# Altium footprint library ProjectFootprints-20261026_223942_842.PcbLib: 49 footprints (part 3 of 4)
Each footprint in its own frame and in the unit in brackets; x right, y up, seen from the top. Pads: shape width x height; smd on the part's side, far side on the other; paste and mask are expansions set on the pad; w line width, h text height; cw(c..) or ccw(c..) is an arc to the next point about the centre after c.
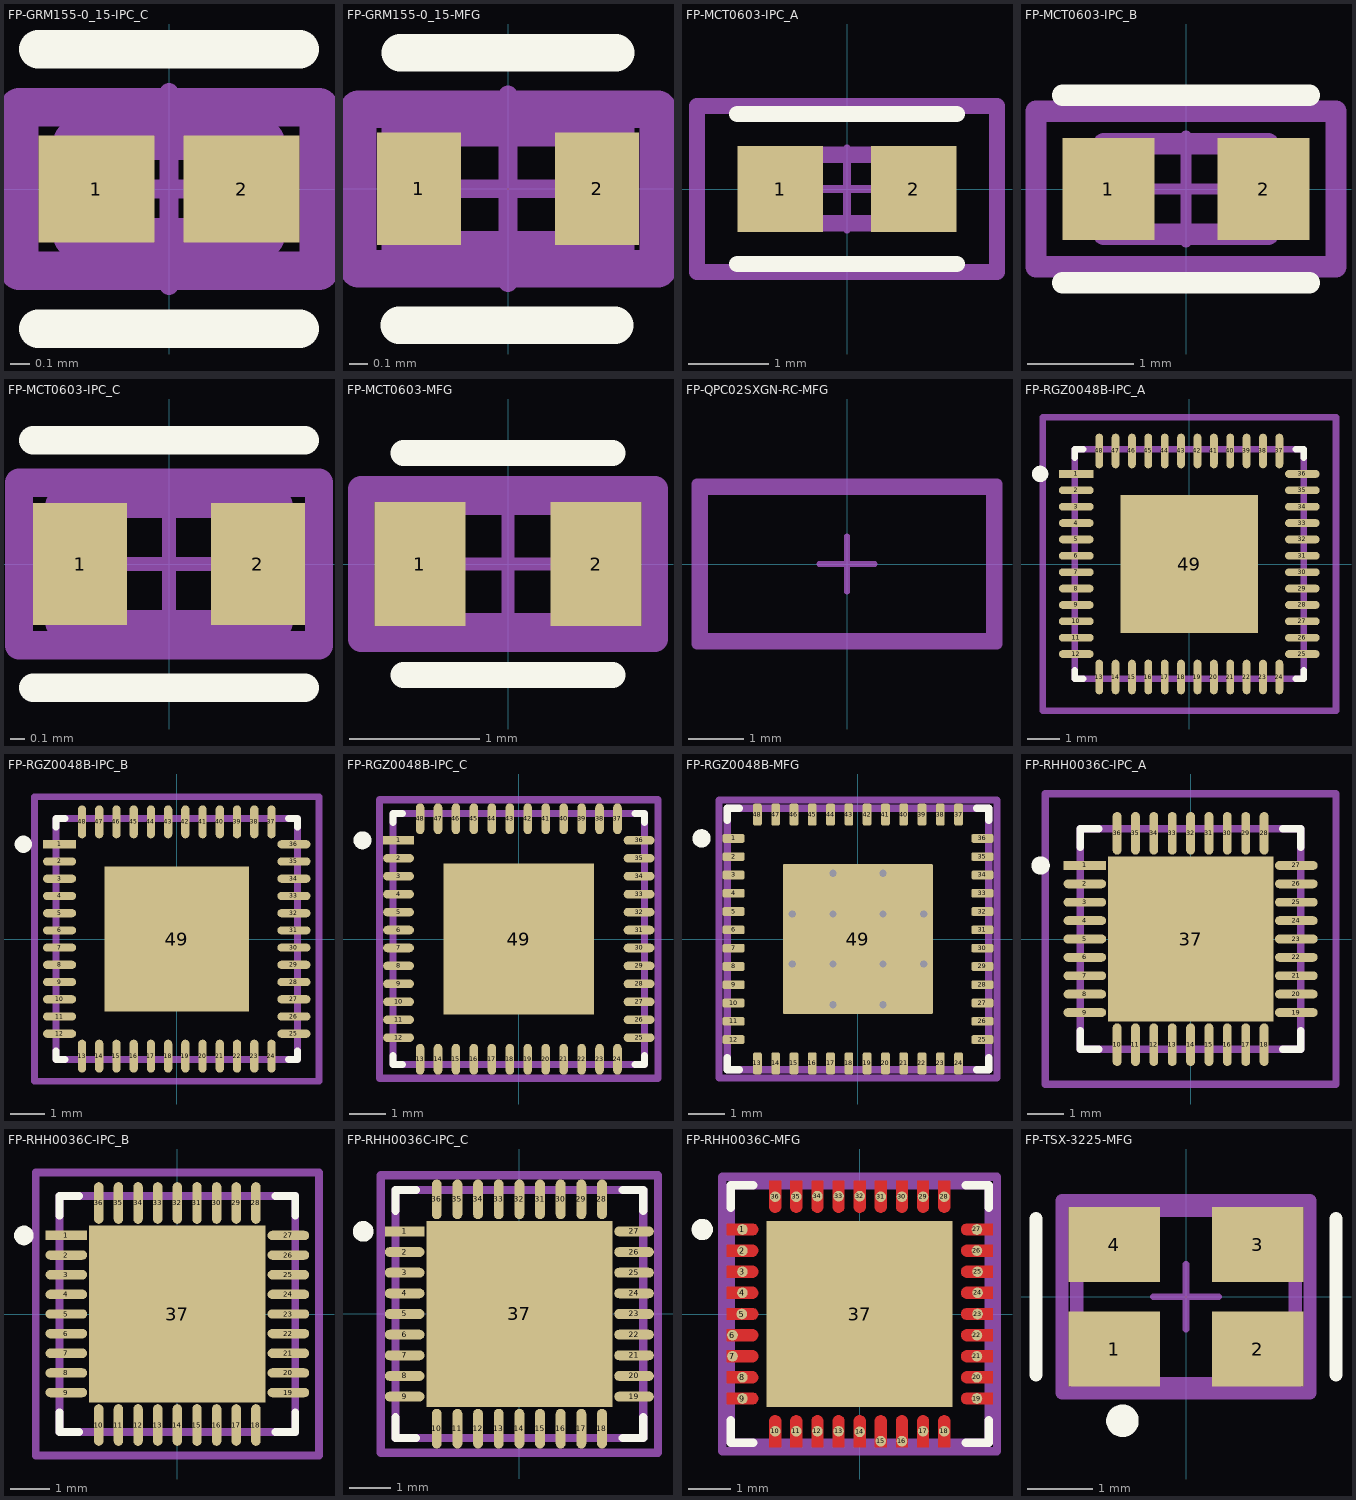
[diagram p2: the footprints below, top view; thin cyan lines are the x and y axes]

## FP-GRM155-0_15-IPC_C [mm]
pads (2):
  rect 0.604x0.558 smd paste+0 mask+0: 1(-0.377,0) 2(0.377,0)
Top Overlay:
  lines w0.2: -0.679,-0.725 0.679,-0.725 ; -0.679,0.725 0.679,0.725
Top Assembly:
  lines w0.2: -0.779,-0.425 -0.779,0.425 0.779,0.425 0.779,-0.425 -0.779,-0.425
  text ".Designator" at 0,0.188 h1
Top 3D Body:
  lines w0.2: -0.5,-0.25 -0.5,0.25 0.5,0.25 0.5,-0.25 -0.5,-0.25
Top Courtyard:
  lines w0.2: -0.779,-0.425 -0.779,0.425 0.779,0.425 0.779,-0.425 -0.779,-0.425
Top Component Center:
  lines w0.1: -0.5,0 0.5,0 ; 0,-0.5 0,0.5
3D body "Cap_Murata_GRM155R61A475MEAAD_eec.STEP": height 0.25, standoff 0, extent -0.779,-0.425 0.779,0.425

## FP-GRM155-0_15-MFG [mm]
pads (2):
  rect 0.45x0.6 smd paste+0 mask+0: 1(-0.475,0) 2(0.475,0)
Top Overlay:
  lines w0.2: -0.58,-0.727 0.57,-0.727 ; -0.575,0.725 0.575,0.725
Top Assembly:
  lines w0.2: -0.8,-0.425 -0.8,0.425 0.8,0.425 0.8,-0.425 -0.8,-0.425
  text ".Designator" at 0,0.188 h1
Top 3D Body:
  lines w0.2: -0.575,-0.325 -0.575,0.325 0.575,0.325 0.575,-0.325 -0.575,-0.325
Top Courtyard:
  lines w0.2: -0.8,-0.425 -0.8,0.425 0.8,0.425 0.8,-0.425 -0.8,-0.425
Top Component Center:
  lines w0.1: -0.5,0 0.5,0 ; 0,-0.5 0,0.5
3D body "Cap_Murata_GRM155R61A475MEAAD_eec.STEP": height 0.25, standoff 0, extent -0.8,-0.425 0.8,0.425

## FP-MCT0603-IPC_A [mm]
pads (2):
  rect 1.064x1.062 smd paste+0 mask+0: 1(-0.829,0) 2(0.829,0)
Top Overlay:
  lines w0.2: -1.361,-0.931 1.361,-0.931 ; -1.361,0.931 1.361,0.931
Top Assembly:
  lines w0.2: -1.861,-1.031 1.861,-1.031 1.861,1.031 -1.861,1.031 -1.861,-1.031
  text ".Designator" at 0,0.188 h1
Top 3D Body:
  lines w0.2: -0.775,-0.425 0.775,-0.425 0.775,0.425 -0.775,0.425 -0.775,-0.425
Top Courtyard:
  lines w0.2: -1.861,-1.031 1.861,-1.031 1.861,1.031 -1.861,1.031 -1.861,-1.031
Top Component Center:
  lines w0.1: -0.5,0 0.5,0 ; 0,-0.5 0,0.5
3D body "Res_Vishay_MCT06030F2152BP100_eec.STEP": height 0.25, standoff 0, extent -1.861,-1.031 1.861,1.031

## FP-MCT0603-IPC_B [mm]
pads (2):
  rect 0.864x0.962 smd paste+0 mask+0: 1(-0.729,0) 2(0.729,0)
Top Overlay:
  lines w0.2: -1.161,-0.881 1.161,-0.881 ; -1.161,0.881 1.161,0.881
Top Assembly:
  lines w0.2: -1.411,-0.731 -1.411,0.731 1.411,0.731 1.411,-0.731 -1.411,-0.731
  text ".Designator" at 0,0.188 h1
Top 3D Body:
  lines w0.2: -0.775,-0.425 -0.775,0.425 0.775,0.425 0.775,-0.425 -0.775,-0.425
Top Courtyard:
  lines w0.2: -1.411,-0.731 -1.411,0.731 1.411,0.731 1.411,-0.731 -1.411,-0.731
Top Component Center:
  lines w0.1: -0.5,0 0.5,0 ; 0,-0.5 0,0.5
3D body "Res_Vishay_MCT06030F2152BP100_eec.STEP": height 0.25, standoff 0, extent -1.411,-0.731 1.411,0.731

## FP-MCT0603-IPC_C [mm]
pads (2):
  rect 0.664x0.862 smd paste+0 mask+0: 1(-0.629,0) 2(0.629,0)
Top Overlay:
  lines w0.2: -0.961,-0.875 0.961,-0.875 ; -0.961,0.875 0.961,0.875
Top Assembly:
  lines w0.2: -1.061,-0.575 -1.061,0.575 1.061,0.575 1.061,-0.575 -1.061,-0.575
  text ".Designator" at 0,0.188 h1
Top 3D Body:
  lines w0.2: -0.775,-0.425 -0.775,0.425 0.775,0.425 0.775,-0.425 -0.775,-0.425
Top Courtyard:
  lines w0.2: -1.061,-0.575 -1.061,0.575 1.061,0.575 1.061,-0.575 -1.061,-0.575
Top Component Center:
  lines w0.1: -0.5,0 0.5,0 ; 0,-0.5 0,0.5
3D body "Res_Vishay_MCT06030F2152BP100_eec.STEP": height 0.25, standoff 0, extent -1.061,-0.575 1.061,0.575

## FP-MCT0603-MFG [mm]
pads (2):
  rect 0.7x0.95 smd paste+0 mask+0: 1(-0.675,0) 2(0.675,0)
Top Overlay:
  lines w0.2: -0.8,-0.85 0.8,-0.85 ; -0.8,0.85 0.8,0.85
Top Assembly:
  lines w0.2: -1.125,-0.575 -1.125,0.575 1.125,0.575 1.125,-0.575 -1.125,-0.575
  text ".Designator" at 0,0.188 h1
Top 3D Body:
  lines w0.2: -0.8,-0.475 -0.8,0.475 0.8,0.475 0.8,-0.475 -0.8,-0.475
Top Courtyard:
  lines w0.2: -1.125,-0.575 -1.125,0.575 1.125,0.575 1.125,-0.575 -1.125,-0.575
Top Component Center:
  lines w0.1: -0.5,0 0.5,0 ; 0,-0.5 0,0.5
3D body "Res_Vishay_MCT06030F2152BP100_eec.STEP": height 0.25, standoff 0, extent -1.125,-0.575 1.125,0.575

## FP-QPC02SXGN-RC-MFG [mm]
Top Assembly:
  lines w0.2: -2.691,-1.433 2.691,-1.433 2.691,1.433 -2.691,1.433 -2.691,-1.433
Top 3D Body:
  lines w0.2: -2.591,-1.333 2.591,-1.333 2.591,1.333 -2.591,1.333 -2.591,-1.333
Top Courtyard:
  lines w0.2: -2.691,-1.433 2.691,-1.433 2.691,1.433 -2.691,1.433 -2.691,-1.433
Top Component Center:
  lines w0.1: -0.5,0 0.5,0 ; 0,-0.5 0,0.5
3D body "Conn_Sullins_QPC02SXGN-RC_eec.STEP": height 0.25, standoff 0, extent -2.691,-1.433 2.691,1.433

## FP-RGZ0048B-IPC_A [mm]
pads (49):
  rect 1.057x0.239 smd paste+0 mask+0: 1(-3.451,2.75)
  rrect100% 1.057x0.239 smd paste+0 mask+0: 2(-3.451,2.25) 3(-3.451,1.75) 4(-3.451,1.25) 5(-3.451,0.75) 6(-3.451,0.25) 7(-3.451,-0.25) 8(-3.451,-0.75) 9(-3.451,-1.25) 10(-3.451,-1.75) 11(-3.451,-2.25) 12(-3.451,-2.75) 25(3.451,-2.75) 26(3.451,-2.25) 27(3.451,-1.75) 28(3.451,-1.25) 29(3.451,-0.75) 30(3.451,-0.25) 31(3.451,0.25) 32(3.451,0.75) 33(3.451,1.25) 34(3.451,1.75) 35(3.451,2.25) 36(3.451,2.75)
  rrect100% 0.239x1.057 smd paste+0 mask+0: 13(-2.75,-3.451) 14(-2.25,-3.451) 15(-1.75,-3.451) 16(-1.25,-3.451) 17(-0.75,-3.451) 18(-0.25,-3.451) 19(0.25,-3.451) 20(0.75,-3.451) 21(1.25,-3.451) 22(1.75,-3.451) 23(2.25,-3.451) 24(2.75,-3.451) 37(2.75,3.451) 38(2.25,3.451) 39(1.75,3.451) 40(1.25,3.451) 41(0.75,3.451) 42(0.25,3.451) 43(-0.25,3.451) 44(-0.75,3.451) 45(-1.25,3.451) 46(-1.75,3.451) 47(-2.25,3.451) 48(-2.75,3.451)
  rect 4.2x4.2 smd paste-1000 mask+0: 49(0,0)
Top Overlay:
  circle w0.25: c-4.554,2.75 r0.125
  lines w0.2: -3.5,-3.245 -3.5,-3.5 -3.245,-3.5 ; -3.5,3.245 -3.5,3.5 -3.245,3.5 ; 3.245,-3.5 3.5,-3.5 3.5,-3.245 ; 3.245,3.5 3.5,3.5 3.5,3.245
Top Paste:
  rectangle: -1.328,-1.328 1.328,1.328
Top Assembly:
  lines w0.2: -4.479,-4.479 -4.479,4.479 4.479,4.479 4.479,-4.479 -4.479,-4.479
  text ".Designator" at 0,-0.001 h1
Top 3D Body:
  lines w0.2: -3.5,-3.5 -3.5,3.5 3.5,3.5 3.5,-3.5 -3.5,-3.5
Top Courtyard:
  lines w0.2: -4.479,-4.479 -4.479,4.479 4.479,4.479 4.479,-4.479 -4.479,-4.479
Top Component Center:
  lines w0.1: -0.5,0 0.5,0 ; 0,-0.5 0,0.5
3D body "IC_Texas_Instruments_DP83867IRRGZR_eec.STEP": height 0.25, standoff 0, extent -4.479,-4.479 4.479,4.479

## FP-RGZ0048B-IPC_B [mm]
pads (49):
  rect 0.957x0.239 smd paste+0 mask+0: 1(-3.401,2.75)
  rrect100% 0.957x0.239 smd paste+0 mask+0: 2(-3.401,2.25) 3(-3.401,1.75) 4(-3.401,1.25) 5(-3.401,0.75) 6(-3.401,0.25) 7(-3.401,-0.25) 8(-3.401,-0.75) 9(-3.401,-1.25) 10(-3.401,-1.75) 11(-3.401,-2.25) 12(-3.401,-2.75) 25(3.401,-2.75) 26(3.401,-2.25) 27(3.401,-1.75) 28(3.401,-1.25) 29(3.401,-0.75) 30(3.401,-0.25) 31(3.401,0.25) 32(3.401,0.75) 33(3.401,1.25) 34(3.401,1.75) 35(3.401,2.25) 36(3.401,2.75)
  rrect100% 0.239x0.957 smd paste+0 mask+0: 13(-2.75,-3.401) 14(-2.25,-3.401) 15(-1.75,-3.401) 16(-1.25,-3.401) 17(-0.75,-3.401) 18(-0.25,-3.401) 19(0.25,-3.401) 20(0.75,-3.401) 21(1.25,-3.401) 22(1.75,-3.401) 23(2.25,-3.401) 24(2.75,-3.401) 37(2.75,3.401) 38(2.25,3.401) 39(1.75,3.401) 40(1.25,3.401) 41(0.75,3.401) 42(0.25,3.401) 43(-0.25,3.401) 44(-0.75,3.401) 45(-1.25,3.401) 46(-1.75,3.401) 47(-2.25,3.401) 48(-2.75,3.401)
  rect 4.2x4.2 smd paste-1000 mask+0: 49(0,0)
Top Overlay:
  circle w0.25: c-4.454,2.75 r0.125
  lines w0.2: -3.5,-3.245 -3.5,-3.5 -3.245,-3.5 ; -3.5,3.245 -3.5,3.5 -3.245,3.5 ; 3.245,-3.5 3.5,-3.5 3.5,-3.245 ; 3.245,3.5 3.5,3.5 3.5,3.245
Top Paste:
  rectangle: -1.328,-1.328 1.328,1.328
Top Assembly:
  lines w0.2: -4.129,-4.129 -4.129,4.129 4.129,4.129 4.129,-4.129 -4.129,-4.129
  text ".Designator" at 0,-0.001 h1
Top 3D Body:
  lines w0.2: -3.5,-3.5 -3.5,3.5 3.5,3.5 3.5,-3.5 -3.5,-3.5
Top Courtyard:
  lines w0.2: -4.129,-4.129 -4.129,4.129 4.129,4.129 4.129,-4.129 -4.129,-4.129
Top Component Center:
  lines w0.1: -0.5,0 0.5,0 ; 0,-0.5 0,0.5
3D body "IC_Texas_Instruments_DP83867IRRGZR_eec.STEP": height 0.25, standoff 0, extent -4.129,-4.129 4.129,4.129

## FP-RGZ0048B-IPC_C [mm]
pads (49):
  rect 0.857x0.239 smd paste+0 mask+0: 1(-3.351,2.75)
  rrect100% 0.857x0.239 smd paste+0 mask+0: 2(-3.351,2.25) 3(-3.351,1.75) 4(-3.351,1.25) 5(-3.351,0.75) 6(-3.351,0.25) 7(-3.351,-0.25) 8(-3.351,-0.75) 9(-3.351,-1.25) 10(-3.351,-1.75) 11(-3.351,-2.25) 12(-3.351,-2.75) 25(3.351,-2.75) 26(3.351,-2.25) 27(3.351,-1.75) 28(3.351,-1.25) 29(3.351,-0.75) 30(3.351,-0.25) 31(3.351,0.25) 32(3.351,0.75) 33(3.351,1.25) 34(3.351,1.75) 35(3.351,2.25) 36(3.351,2.75)
  rrect100% 0.239x0.857 smd paste+0 mask+0: 13(-2.75,-3.351) 14(-2.25,-3.351) 15(-1.75,-3.351) 16(-1.25,-3.351) 17(-0.75,-3.351) 18(-0.25,-3.351) 19(0.25,-3.351) 20(0.75,-3.351) 21(1.25,-3.351) 22(1.75,-3.351) 23(2.25,-3.351) 24(2.75,-3.351) 37(2.75,3.351) 38(2.25,3.351) 39(1.75,3.351) 40(1.25,3.351) 41(0.75,3.351) 42(0.25,3.351) 43(-0.25,3.351) 44(-0.75,3.351) 45(-1.25,3.351) 46(-1.75,3.351) 47(-2.25,3.351) 48(-2.75,3.351)
  rect 4.2x4.2 smd paste-1000 mask+0: 49(0,0)
Top Overlay:
  circle w0.25: c-4.354,2.75 r0.125
  lines w0.2: -3.5,-3.245 -3.5,-3.5 -3.245,-3.5 ; -3.5,3.245 -3.5,3.5 -3.245,3.5 ; 3.245,-3.5 3.5,-3.5 3.5,-3.245 ; 3.245,3.5 3.5,3.5 3.5,3.245
Top Paste:
  rectangle: -1.328,-1.328 1.328,1.328
Top Assembly:
  lines w0.2: -3.879,-3.879 -3.879,3.879 3.879,3.879 3.879,-3.879 -3.879,-3.879
  text ".Designator" at 0,-0.001 h1
Top 3D Body:
  lines w0.2: -3.5,-3.5 -3.5,3.5 3.5,3.5 3.5,-3.5 -3.5,-3.5
Top Courtyard:
  lines w0.2: -3.879,-3.879 -3.879,3.879 3.879,3.879 3.879,-3.879 -3.879,-3.879
Top Component Center:
  lines w0.1: -0.5,0 0.5,0 ; 0,-0.5 0,0.5
3D body "IC_Texas_Instruments_DP83867IRRGZR_eec.STEP": height 0.25, standoff 0, extent -3.879,-3.879 3.879,3.879

## FP-RGZ0048B-MFG [mm]
pads (49):
  rrect42% 0.6x0.24 smd paste+0 mask+0: 1(-3.4,2.75) 2(-3.4,2.25) 3(-3.4,1.75) 4(-3.4,1.25) 5(-3.4,0.75) 6(-3.4,0.25) 7(-3.4,-0.25) 8(-3.4,-0.75) 9(-3.4,-1.25) 10(-3.4,-1.75) 11(-3.4,-2.25) 12(-3.4,-2.75) 25(3.4,-2.75) 26(3.4,-2.25) 27(3.4,-1.75) 28(3.4,-1.25) 29(3.4,-0.75) 30(3.4,-0.25) 31(3.4,0.25) 32(3.4,0.75) 33(3.4,1.25) 34(3.4,1.75) 35(3.4,2.25) 36(3.4,2.75)
  rrect42% 0.24x0.6 smd paste+0 mask+0: 13(-2.75,-3.4) 14(-2.25,-3.4) 15(-1.75,-3.4) 16(-1.25,-3.4) 17(-0.75,-3.4) 18(-0.25,-3.4) 19(0.25,-3.4) 20(0.75,-3.4) 21(1.25,-3.4) 22(1.75,-3.4) 23(2.25,-3.4) 24(2.75,-3.4) 37(2.75,3.4) 38(2.25,3.4) 39(1.75,3.4) 40(1.25,3.4) 41(0.75,3.4) 42(0.25,3.4) 43(-0.25,3.4) 44(-0.75,3.4) 45(-1.25,3.4) 46(-1.75,3.4) 47(-2.25,3.4) 48(-2.75,3.4)
  rrect2% 4.1x4.1 smd paste-1000 mask+0: 49(0,0)
via -1.8,0.685 diameter 0.5 hole 0.2
via -1.8,-0.685 diameter 0.5 hole 0.2
via -0.685,-0.685 diameter 0.5 hole 0.2
via -0.685,0.685 diameter 0.5 hole 0.2
via 0.685,0.685 diameter 0.5 hole 0.2
via 1.8,0.685 diameter 0.5 hole 0.2
via 0.685,-0.685 diameter 0.5 hole 0.2
via 1.8,-0.685 diameter 0.5 hole 0.2
via -0.685,1.8 diameter 0.5 hole 0.2
via -0.685,-1.8 diameter 0.5 hole 0.2
via 0.685,-1.8 diameter 0.5 hole 0.2
via 0.685,1.8 diameter 0.5 hole 0.2
Top Overlay:
  circle w0.25: c-4.275,2.75 r0.125
  lines w0.2: -3.575,-3.245 -3.575,-3.575 -3.245,-3.575 ; -3.575,3.245 -3.575,3.575 -3.245,3.575 ; 3.245,-3.575 3.575,-3.575 3.575,-3.245 ; 3.245,3.575 3.575,3.575 3.575,3.245
Top Paste:
  drawing of 9 lines, arcs and shapes, not listed
Top Assembly:
  lines w0.2: -3.8,-3.8 3.8,-3.8 3.8,3.8 -3.8,3.8 -3.8,-3.8
  text ".Designator" at 0,-0.001 h1
Top 3D Body:
  lines w0.2: -3.575,-3.575 3.575,-3.575 3.575,3.575 -3.575,3.575 -3.575,-3.575
Top Courtyard:
  lines w0.2: -3.8,-3.8 3.8,-3.8 3.8,3.8 -3.8,3.8 -3.8,-3.8
Top Component Center:
  lines w0.1: -0.5,0 0.5,0 ; 0,-0.5 0,0.5
3D body "IC_Texas_Instruments_DP83867IRRGZR_eec.STEP": height 0.25, standoff 0, extent -3.8,-3.8 3.8,3.8

## FP-RHH0036C-IPC_A [mm]
pads (37):
  rect 1.16x0.239 smd paste+0 mask+0: 1(-2.876,2)
  rrect100% 1.16x0.239 smd paste+0 mask+0: 2(-2.876,1.5) 3(-2.876,1) 4(-2.876,0.5) 5(-2.876,0) 6(-2.876,-0.5) 7(-2.876,-1) 8(-2.876,-1.5) 9(-2.876,-2) 19(2.876,-2) 20(2.876,-1.5) 21(2.876,-1) 22(2.876,-0.5) 23(2.876,0) 24(2.876,0.5) 25(2.876,1) 26(2.876,1.5) 27(2.876,2)
  rrect100% 0.239x1.16 smd paste+0 mask+0: 10(-2,-2.876) 11(-1.5,-2.876) 12(-1,-2.876) 13(-0.5,-2.876) 14(0,-2.876) 15(0.5,-2.876) 16(1,-2.876) 17(1.5,-2.876) 18(2,-2.876) 28(2,2.876) 29(1.5,2.876) 30(1,2.876) 31(0.5,2.876) 32(0,2.876) 33(-0.5,2.876) 34(-1,2.876) 35(-1.5,2.876) 36(-2,2.876)
  rect 4.5x4.5 smd paste-1000 mask+0: 37(0,0)
Top Overlay:
  circle w0.25: c-4.081,2 r0.125
  lines w0.2: -3,-2.5 -3,-3 -2.5,-3 ; -3,2.5 -3,3 -2.5,3 ; 2.5,-3 3,-3 3,-2.5 ; 2.5,3 3,3 3,2.5
Top Paste:
  rectangle: -1.699,0.276 -0.276,1.699
  rectangle: 0.276,0.276 1.699,1.699
  rectangle: -1.699,-1.699 -0.276,-0.276
  rectangle: 0.276,-1.699 1.699,-0.276
Top Assembly:
  lines w0.2: -3.956,-3.956 3.956,-3.956 3.956,3.956 -3.956,3.956 -3.956,-3.956
  text ".Designator" at 0,-0.001 h1
Top 3D Body:
  lines w0.2: -3,-3 3,-3 3,3 -3,3 -3,-3
Top Courtyard:
  lines w0.2: -3.956,-3.956 3.956,-3.956 3.956,3.956 -3.956,3.956 -3.956,-3.956
Top Component Center:
  lines w0.1: -0.5,0 0.5,0 ; 0,-0.5 0,0.5
3D body "IC_Texas_Instruments_CC1110F32RHHR_eec.STEP": height 0.25, standoff 0, extent -3.956,-3.956 3.956,3.956

## FP-RHH0036C-IPC_B [mm]
pads (37):
  rect 1.06x0.239 smd paste+0 mask+0: 1(-2.826,2)
  rrect100% 1.06x0.239 smd paste+0 mask+0: 2(-2.826,1.5) 3(-2.826,1) 4(-2.826,0.5) 5(-2.826,0) 6(-2.826,-0.5) 7(-2.826,-1) 8(-2.826,-1.5) 9(-2.826,-2) 19(2.826,-2) 20(2.826,-1.5) 21(2.826,-1) 22(2.826,-0.5) 23(2.826,0) 24(2.826,0.5) 25(2.826,1) 26(2.826,1.5) 27(2.826,2)
  rrect100% 0.239x1.06 smd paste+0 mask+0: 10(-2,-2.826) 11(-1.5,-2.826) 12(-1,-2.826) 13(-0.5,-2.826) 14(0,-2.826) 15(0.5,-2.826) 16(1,-2.826) 17(1.5,-2.826) 18(2,-2.826) 28(2,2.826) 29(1.5,2.826) 30(1,2.826) 31(0.5,2.826) 32(0,2.826) 33(-0.5,2.826) 34(-1,2.826) 35(-1.5,2.826) 36(-2,2.826)
  rect 4.5x4.5 smd paste-1000 mask+0: 37(0,0)
Top Overlay:
  circle w0.25: c-3.906,2 r0.125
  lines w0.2: -3,-2.5 -3,-3 -2.5,-3 ; -3,2.5 -3,3 -2.5,3 ; 2.5,-3 3,-3 3,-2.5 ; 2.5,3 3,3 3,2.5
Top Paste:
  rectangle: 0.276,-1.699 1.699,-0.276
  rectangle: -1.699,-1.699 -0.276,-0.276
  rectangle: 0.276,0.276 1.699,1.699
  rectangle: -1.699,0.276 -0.276,1.699
Top Assembly:
  lines w0.2: -3.606,-3.606 -3.606,3.606 3.606,3.606 3.606,-3.606 -3.606,-3.606
  text ".Designator" at 0,-0.001 h1
Top 3D Body:
  lines w0.2: -3,-3 -3,3 3,3 3,-3 -3,-3
Top Courtyard:
  lines w0.2: -3.606,-3.606 -3.606,3.606 3.606,3.606 3.606,-3.606 -3.606,-3.606
Top Component Center:
  lines w0.1: -0.5,0 0.5,0 ; 0,-0.5 0,0.5
3D body "IC_Texas_Instruments_CC1110F32RHHR_eec.STEP": height 0.25, standoff 0, extent -3.606,-3.606 3.606,3.606

## FP-RHH0036C-IPC_C [mm]
pads (37):
  rect 0.96x0.239 smd paste+0 mask+0: 1(-2.776,2)
  rrect100% 0.96x0.239 smd paste+0 mask+0: 2(-2.776,1.5) 3(-2.776,1) 4(-2.776,0.5) 5(-2.776,0) 6(-2.776,-0.5) 7(-2.776,-1) 8(-2.776,-1.5) 9(-2.776,-2) 19(2.776,-2) 20(2.776,-1.5) 21(2.776,-1) 22(2.776,-0.5) 23(2.776,0) 24(2.776,0.5) 25(2.776,1) 26(2.776,1.5) 27(2.776,2)
  rrect100% 0.239x0.96 smd paste+0 mask+0: 10(-2,-2.776) 11(-1.5,-2.776) 12(-1,-2.776) 13(-0.5,-2.776) 14(0,-2.776) 15(0.5,-2.776) 16(1,-2.776) 17(1.5,-2.776) 18(2,-2.776) 28(2,2.776) 29(1.5,2.776) 30(1,2.776) 31(0.5,2.776) 32(0,2.776) 33(-0.5,2.776) 34(-1,2.776) 35(-1.5,2.776) 36(-2,2.776)
  rect 4.5x4.5 smd paste-1000 mask+0: 37(0,0)
Top Overlay:
  circle w0.25: c-3.781,2 r0.125
  lines w0.2: -3,-2.5 -3,-3 -2.5,-3 ; -3,2.5 -3,3 -2.5,3 ; 2.5,-3 3,-3 3,-2.5 ; 2.5,3 3,3 3,2.5
Top Paste:
  rectangle: 0.276,-1.699 1.699,-0.276
  rectangle: -1.699,-1.699 -0.276,-0.276
  rectangle: 0.276,0.276 1.699,1.699
  rectangle: -1.699,0.276 -0.276,1.699
Top Assembly:
  lines w0.2: -3.356,-3.356 -3.356,3.356 3.356,3.356 3.356,-3.356 -3.356,-3.356
  text ".Designator" at 0,-0.001 h1
Top 3D Body:
  lines w0.2: -3,-3 -3,3 3,3 3,-3 -3,-3
Top Courtyard:
  lines w0.2: -3.356,-3.356 -3.356,3.356 3.356,3.356 3.356,-3.356 -3.356,-3.356
Top Component Center:
  lines w0.1: -0.5,0 0.5,0 ; 0,-0.5 0,0.5
3D body "IC_Texas_Instruments_CC1110F32RHHR_eec.STEP": height 0.25, standoff 0, extent -3.356,-3.356 3.356,3.356

## FP-RHH0036C-MFG [mm]
pads (37):
  round 0.252 smd paste+0 mask+0: 1(-2.775,2) 2(-2.775,1.5) 3(-2.775,1) 4(-2.775,0.5) 5(-2.789,0) 6(-3.01,-0.5) 7(-3.01,-1) 8(-2.775,-1.5) 9(-2.775,-2) 10(-2,-2.775) 11(-1.5,-2.775) 12(-1,-2.775) 13(-0.5,-2.775) 14(0,-2.789) 15(0.5,-3.01) 16(1,-3.01) 17(1.5,-2.775) 18(2,-2.775) 19(2.775,-2) 20(2.775,-1.5) 21(2.775,-1) 22(2.775,-0.5) 23(2.789,0) 24(2.789,0.5) 25(2.789,1) 26(2.775,1.5) 27(2.775,2) 28(2,2.775) 29(1.5,2.775) 30(1,2.775) 31(0.5,2.775) 32(0,2.789) 33(-0.5,2.789) 34(-1,2.789) 35(-1.5,2.775) 36(-2,2.775)
  rect 4.4x4.4 smd paste+0 mask+0: 37(0,0)
Top Layer:
  region: -1.86,3.15 -1.86,2.54 -1.86,2.512 -1.881,2.461 -1.921,2.421 -1.972,2.4 -2,2.4 -2.028,2.4 -2.079,2.421 -2.119,2.461 -2.14,2.512 -2.14,2.54 -2.14,3.15
  region: -1.36,3.15 -1.36,2.54 -1.36,2.512 -1.381,2.461 -1.421,2.421 -1.472,2.4 -1.5,2.4 -1.528,2.4 -1.579,2.421 -1.619,2.461 -1.64,2.512 -1.64,2.54 -1.64,3.15
  region: -0.86,3.15 -0.86,2.54 -0.86,2.512 -0.881,2.461 -0.921,2.421 -0.972,2.4 -1,2.4 -1.028,2.4 -1.079,2.421 -1.119,2.461 -1.14,2.512 -1.14,2.54 -1.14,3.15
  region: -0.36,3.15 -0.36,2.54 -0.36,2.512 -0.381,2.461 -0.421,2.421 -0.472,2.4 -0.5,2.4 -0.528,2.4 -0.579,2.421 -0.619,2.461 -0.64,2.512 -0.64,2.54 -0.64,3.15
  region: 0.14,3.15 0.14,2.54 0.14,2.512 0.119,2.461 0.079,2.421 0.028,2.4 0,2.4 -0.028,2.4 -0.079,2.421 -0.119,2.461 -0.14,2.512 -0.14,2.54 -0.14,3.15
  region: 0.64,3.15 0.64,2.54 0.64,2.512 0.619,2.461 0.579,2.421 0.528,2.4 0.5,2.4 0.472,2.4 0.421,2.421 0.381,2.461 0.36,2.512 0.36,2.54 0.36,3.15
  region: 1.14,3.15 1.14,2.54 1.14,2.512 1.119,2.461 1.079,2.421 1.028,2.4 1,2.4 0.972,2.4 0.921,2.421 0.881,2.461 0.86,2.512 0.86,2.54 0.86,3.15
  region: 1.64,3.15 1.64,2.54 1.64,2.512 1.619,2.461 1.579,2.421 1.528,2.4 1.5,2.4 1.472,2.4 1.421,2.421 1.381,2.461 1.36,2.512 1.36,2.54 1.36,3.15
  region: 2.14,3.15 2.14,2.54 2.14,2.512 2.119,2.461 2.079,2.421 2.028,2.4 2,2.4 1.972,2.4 1.921,2.421 1.881,2.461 1.86,2.512 1.86,2.54 1.86,3.15
  region: 1.86,-3.15 1.86,-2.54 1.86,-2.512 1.881,-2.461 1.921,-2.421 1.972,-2.4 2,-2.4 2.028,-2.4 2.079,-2.421 2.119,-2.461 2.14,-2.512 2.14,-2.54 2.14,-3.15
  region: 1.36,-3.15 1.36,-2.54 1.36,-2.512 1.381,-2.461 1.421,-2.421 1.472,-2.4 1.5,-2.4 1.528,-2.4 1.579,-2.421 1.619,-2.461 1.64,-2.512 1.64,-2.54 1.64,-3.15
  region: 0.86,-3.15 0.86,-2.54 0.86,-2.512 0.881,-2.461 0.921,-2.421 0.972,-2.4 1,-2.4 1.028,-2.4 1.079,-2.421 1.119,-2.461 1.14,-2.512 1.14,-2.54 1.14,-3.15
  region: 0.36,-3.15 0.36,-2.54 0.36,-2.512 0.381,-2.461 0.421,-2.421 0.472,-2.4 0.5,-2.4 0.528,-2.4 0.579,-2.421 0.619,-2.461 0.64,-2.512 0.64,-2.54 0.64,-3.15
  region: -0.14,-3.15 -0.14,-2.54 -0.14,-2.512 -0.119,-2.461 -0.079,-2.421 -0.028,-2.4 0,-2.4 0.028,-2.4 0.079,-2.421 0.119,-2.461 0.14,-2.512 0.14,-2.54 0.14,-3.15
  region: -0.64,-3.15 -0.64,-2.54 -0.64,-2.512 -0.619,-2.461 -0.579,-2.421 -0.528,-2.4 -0.5,-2.4 -0.472,-2.4 -0.421,-2.421 -0.381,-2.461 -0.36,-2.512 -0.36,-2.54 -0.36,-3.15
  region: -1.14,-3.15 -1.14,-2.54 -1.14,-2.512 -1.119,-2.461 -1.079,-2.421 -1.028,-2.4 -1,-2.4 -0.972,-2.4 -0.921,-2.421 -0.881,-2.461 -0.86,-2.512 -0.86,-2.54 -0.86,-3.15
  region: -1.64,-3.15 -1.64,-2.54 -1.64,-2.512 -1.619,-2.461 -1.579,-2.421 -1.528,-2.4 -1.5,-2.4 -1.472,-2.4 -1.421,-2.421 -1.381,-2.461 -1.36,-2.512 -1.36,-2.54 -1.36,-3.15
  region: -2.14,-3.15 -2.14,-2.54 -2.14,-2.512 -2.119,-2.461 -2.079,-2.421 -2.028,-2.4 -2,-2.4 -1.972,-2.4 -1.921,-2.421 -1.881,-2.461 -1.86,-2.512 -1.86,-2.54 -1.86,-3.15
  region: 3.15,1.86 2.54,1.86 2.512,1.86 2.461,1.881 2.421,1.921 2.4,1.972 2.4,2 2.4,2.028 2.421,2.079 2.461,2.119 2.512,2.14 2.54,2.14 3.15,2.14
  region: 3.15,1.36 2.54,1.36 2.512,1.36 2.461,1.381 2.421,1.421 2.4,1.472 2.4,1.5 2.4,1.528 2.421,1.579 2.461,1.619 2.512,1.64 2.54,1.64 3.15,1.64
  region: 3.15,0.86 2.54,0.86 2.512,0.86 2.461,0.881 2.421,0.921 2.4,0.972 2.4,1 2.4,1.028 2.421,1.079 2.461,1.119 2.512,1.14 2.54,1.14 3.15,1.14
  region: 3.15,0.36 2.54,0.36 2.512,0.36 2.461,0.381 2.421,0.421 2.4,0.472 2.4,0.5 2.4,0.528 2.421,0.579 2.461,0.619 2.512,0.64 2.54,0.64 3.15,0.64
  region: 3.15,-0.14 2.54,-0.14 2.512,-0.14 2.461,-0.119 2.421,-0.079 2.4,-0.028 2.4,0 2.4,0.028 2.421,0.079 2.461,0.119 2.512,0.14 2.54,0.14 3.15,0.14
  region: 3.15,-0.64 2.54,-0.64 2.512,-0.64 2.461,-0.619 2.421,-0.579 2.4,-0.528 2.4,-0.5 2.4,-0.472 2.421,-0.421 2.461,-0.381 2.512,-0.36 2.54,-0.36 3.15,-0.36
  region: 3.15,-1.14 2.54,-1.14 2.512,-1.14 2.461,-1.119 2.421,-1.079 2.4,-1.028 2.4,-1 2.4,-0.972 2.421,-0.921 2.461,-0.881 2.512,-0.86 2.54,-0.86 3.15,-0.86
  region: 3.15,-1.64 2.54,-1.64 2.512,-1.64 2.461,-1.619 2.421,-1.579 2.4,-1.528 2.4,-1.5 2.4,-1.472 2.421,-1.421 2.461,-1.381 2.512,-1.36 2.54,-1.36 3.15,-1.36
  region: 3.15,-2.14 2.54,-2.14 2.512,-2.14 2.461,-2.119 2.421,-2.079 2.4,-2.028 2.4,-2 2.4,-1.972 2.421,-1.921 2.461,-1.881 2.512,-1.86 2.54,-1.86 3.15,-1.86
  region: -3.15,-1.86 -2.54,-1.86 -2.512,-1.86 -2.461,-1.881 -2.421,-1.921 -2.4,-1.972 -2.4,-2 -2.4,-2.028 -2.421,-2.079 -2.461,-2.119 -2.512,-2.14 -2.54,-2.14 -3.15,-2.14
  region: -3.15,-1.36 -2.54,-1.36 -2.512,-1.36 -2.461,-1.381 -2.421,-1.421 -2.4,-1.472 -2.4,-1.5 -2.4,-1.528 -2.421,-1.579 -2.461,-1.619 -2.512,-1.64 -2.54,-1.64 -3.15,-1.64
  region: -3.15,-0.86 -2.54,-0.86 -2.512,-0.86 -2.461,-0.881 -2.421,-0.921 -2.4,-0.972 -2.4,-1 -2.4,-1.028 -2.421,-1.079 -2.461,-1.119 -2.512,-1.14 -2.54,-1.14 -3.15,-1.14
  region: -3.15,-0.36 -2.54,-0.36 -2.512,-0.36 -2.461,-0.381 -2.421,-0.421 -2.4,-0.472 -2.4,-0.5 -2.4,-0.528 -2.421,-0.579 -2.461,-0.619 -2.512,-0.64 -2.54,-0.64 -3.15,-0.64
  region: -3.15,0.14 -2.54,0.14 -2.512,0.14 -2.461,0.119 -2.421,0.079 -2.4,0.028 -2.4,0 -2.4,-0.028 -2.421,-0.079 -2.461,-0.119 -2.512,-0.14 -2.54,-0.14 -3.15,-0.14
  region: -3.15,0.64 -2.54,0.64 -2.512,0.64 -2.461,0.619 -2.421,0.579 -2.4,0.528 -2.4,0.5 -2.4,0.472 -2.421,0.421 -2.461,0.381 -2.512,0.36 -2.54,0.36 -3.15,0.36
  region: -3.15,1.14 -2.54,1.14 -2.512,1.14 -2.461,1.119 -2.421,1.079 -2.4,1.028 -2.4,1 -2.4,0.972 -2.421,0.921 -2.461,0.881 -2.512,0.86 -2.54,0.86 -3.15,0.86
  region: -3.15,1.64 -2.54,1.64 -2.512,1.64 -2.461,1.619 -2.421,1.579 -2.4,1.528 -2.4,1.5 -2.4,1.472 -2.421,1.421 -2.461,1.381 -2.512,1.36 -2.54,1.36 -3.15,1.36
  region: -3.15,2.14 -2.54,2.14 -2.512,2.14 -2.461,2.119 -2.421,2.079 -2.4,2.028 -2.4,2 -2.4,1.972 -2.421,1.921 -2.461,1.881 -2.512,1.86 -2.54,1.86 -3.15,1.86
Top Overlay:
  circle w0.25: c-3.725,2 r0.125
  lines w0.2: -3.05,-2.515 -3.05,-3.05 -2.515,-3.05 ; -3.05,2.515 -3.05,3.05 -2.515,3.05 ; 2.515,-3.05 3.05,-3.05 3.05,-2.515 ; 2.515,3.05 3.05,3.05 3.05,2.515
Top Assembly:
  lines w0.2: -3.25,-3.25 -3.25,3.25 3.25,3.25 3.25,-3.25 -3.25,-3.25
  text ".Designator" at 0,0.188 h1
Top 3D Body:
  lines w0.2: -3.05,-3.05 -3.05,3.05 3.05,3.05 3.05,-3.05 -3.05,-3.05
Top Courtyard:
  lines w0.2: -3.25,-3.25 -3.25,3.25 3.25,3.25 3.25,-3.25 -3.25,-3.25
Top Component Center:
  lines w0.1: -0.5,0 0.5,0 ; 0,-0.5 0,0.5
3D body "IC_Texas_Instruments_CC1110F32RHHR_eec.STEP": height 0.25, standoff 0, extent -3.25,-3.25 3.25,3.25

## FP-TSX-3225-MFG [mm]
pads (4):
  rect 1.4x1.15 smd paste+0 mask+0: 1(-1.1,-0.8) 2(1.1,-0.8) 3(1.1,0.8) 4(-1.1,0.8)
Top Overlay:
  circle w0.25: c-0.975,-1.9 r0.125
  lines w0.2: -2.3,-1.2 -2.3,1.2 ; 2.3,-1.2 2.3,1.2
Top Assembly:
  lines w0.2: -1.9,-1.475 1.9,-1.475 1.9,1.475 -1.9,1.475 -1.9,-1.475
  text ".Designator" at 0,0.188 h1
Top 3D Body:
  lines w0.2: -1.675,-1.325 1.675,-1.325 1.675,1.325 -1.675,1.325 -1.675,-1.325
Top Courtyard:
  lines w0.2: -1.9,-1.475 1.9,-1.475 1.9,1.475 -1.9,1.475 -1.9,-1.475
Top Component Center:
  lines w0.1: -0.5,0 0.5,0 ; 0,-0.5 0,0.5
3D body "Crys_EPSON_TSX-3225_16_0000MF18X-AC0_eec.STEP": height 0.25, standoff 0, extent -1.9,-1.475 1.9,1.475